# Altium footprint library IC.PcbLib: 204 footprints (part 7 of 13)
Each footprint in its own frame and in the unit in brackets; x right, y up, seen from the top. Pads: shape width x height; smd on the part's side, far side on the other; paste and mask are expansions set on the pad; w line width, h text height; cw(c..) or ccw(c..) is an arc to the next point about the centre after c.
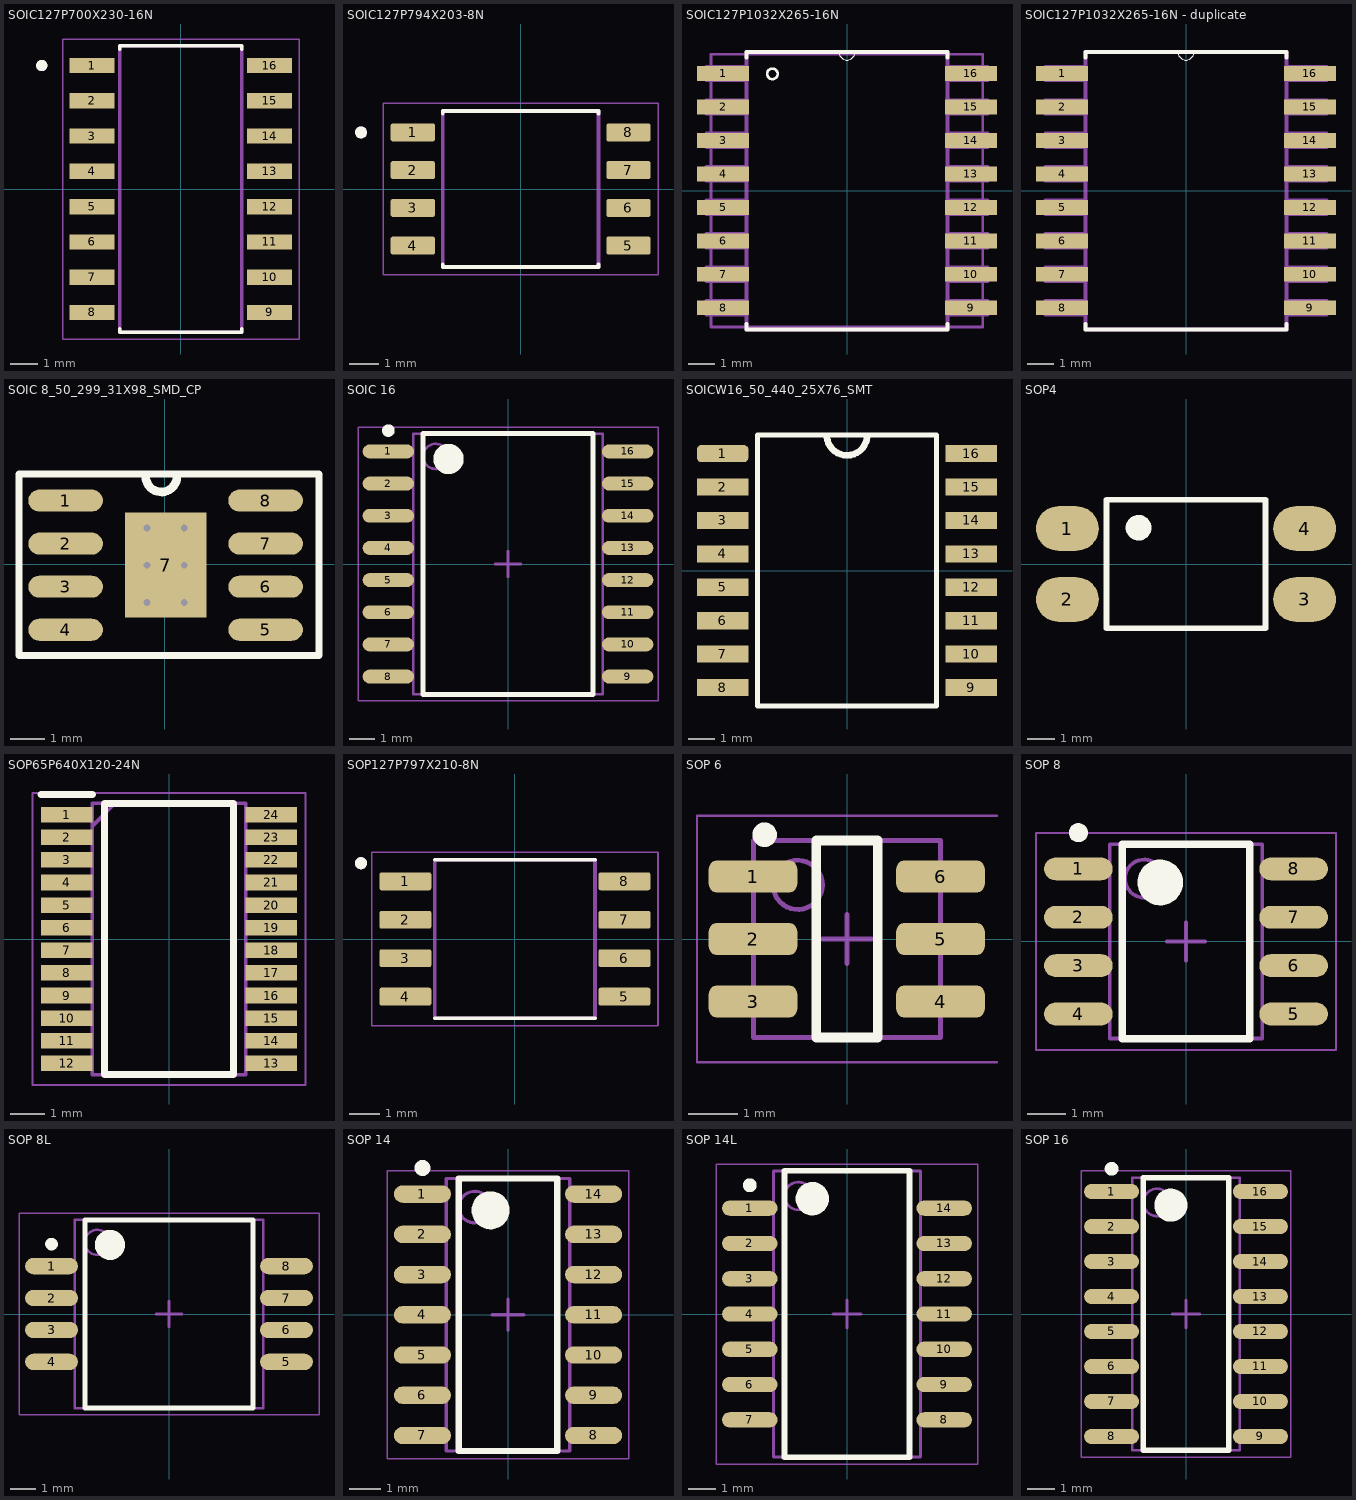
[diagram p6: the footprints below, top view; thin cyan lines are the x and y axes]

## SOIC127P700X230-16N [mm]
height 2.3
pads (16):
  rect 1.62x0.55 smd: 1(-3.195,4.445) 2(-3.195,3.175) 3(-3.195,1.905) 4(-3.195,0.635) 5(-3.195,-0.635) 6(-3.195,-1.905) 7(-3.195,-3.175) 8(-3.195,-4.445) 9(3.195,-4.445) 10(3.195,-3.175) 11(3.195,-1.905) 12(3.195,-0.635) 13(3.195,0.635) 14(3.195,1.905) 15(3.195,3.175) 16(3.195,4.445)
Top Overlay:
  circle w0.2: c-5.005,4.445 r0.1
  lines w0.127: -2.2,-5.04 -2.2,-5.15 2.2,-5.15 2.2,-5.04 ; -2.2,5.04 -2.2,5.15 2.2,5.15 2.2,5.04
Mechanical 13:
  circle w0.2: c-5.005,4.445 r0.1
  lines w0.127: -2.2,-5.15 -2.2,5.15 2.2,5.15 2.2,-5.15 -2.2,-5.15
Mechanical 15:
  lines w0.05: -4.255,-5.4 4.255,-5.4 4.255,5.4 -4.255,5.4 -4.255,-5.4
3D body "step_temp.STEP": height 2.3, standoff 0, extent -3.5,-5.15 3.5,5.15

## SOIC127P794X203-8N [mm]
height 2.03
pads (8):
  rrect25% 1.49x0.61 smd paste+0 mask+0.102: 1(-3.63,1.905) 2(-3.63,0.635) 3(-3.63,-0.635) 4(-3.63,-1.905) 5(3.63,-1.905) 6(3.63,-0.635) 7(3.63,0.635) 8(3.63,1.905)
Top Overlay:
  circle w0.2: c-5.375,1.905 r0.1
  lines w0.127: -2.625,-2.53 -2.625,-2.63 2.625,-2.63 2.625,-2.53 ; -2.625,2.53 -2.625,2.63 2.625,2.63 2.625,2.53
Mechanical 13:
  circle w0.2: c-5.375,1.905 r0.1
  lines w0.127: -2.625,-2.63 2.625,-2.63 2.625,2.63 -2.625,2.63 -2.625,-2.63
Mechanical 15:
  lines w0.05: -4.625,-2.88 -4.625,2.88 4.625,2.88 4.625,-2.88 -4.625,-2.88
3D body "SO8 Medium 5.28mm.step": height 2.03, standoff 0, extent -4.13,-2.665 4.13,2.665

## SOIC127P1032X265-16N [mil]
pads (16):
  rect 78x22 smd: 1(-185,175) 2(-185,125) 3(-185,75) 4(-185,25) 5(-185,-25) 6(-185,-75) 7(-185,-125) 8(-185,-175) 9(185,-175) 10(185,-125) 11(185,-75) 12(185,-25) 13(185,25) 14(185,75) 15(185,125) 16(185,175)
Top Overlay:
  circle w3.94: c-111.42,174.41 r7.87
  lines w0: -12,207 ccw(c0,207) 12,207
  lines w6: -150,-199 -150,-207 150,-207 150,-199 ; -150,199 -150,207 -12,207 12,207 150,207 150,199
Top Assembly:
  lines w3.94: -203.15,-203.54 -203.15,203.54 202.76,203.54 202.76,-203.54 -203.15,-203.54
  text "+" at -8.27,-12.74 h39.37
Mechanical 13:
  lines w0: -12,207 ccw(c0,207) 12,207
  lines w6: -210,-185 -210,-165 -150,-165 -150,-185 -210,-185 ; -210,-135 -210,-115 -150,-115 -150,-135 -210,-135 ; -210,-85 -210,-65 -150,-65 -150,-85 -210,-85 ; -210,-35 -210,-15 -150,-15 -150,-35 -210,-35 ; -210,15 -210,35 -150,35 -150,15 -210,15 ; -210,65 -210,85 -150,85 -150,65 -210,65 ; -210,115 -210,135 -150,135 -150,115 -210,115 ; -210,165 -210,185 -150,185 -150,165 -210,165 ; -150,-207 150,-207 150,207 12,207 -12,207 -150,207 -150,-207 ; 150,-185 150,-165 210,-165 210,-185 150,-185 ; 150,-135 150,-115 210,-115 210,-135 150,-135 ; 150,-85 150,-65 210,-65 210,-85 150,-85 ; 150,-35 150,-15 210,-15 210,-35 150,-35 ; 150,15 150,35 210,35 210,15 150,15 ; 150,65 150,85 210,85 210,65 150,65 ; 150,115 150,135 210,135 210,115 150,115 ; 150,165 150,185 210,185 210,165 150,165
3D body "User Library-SO-16W.STEP": height 97.64, standoff 0, extent -202.95,-203.36 202.96,203.34

## SOIC127P1032X265-16N - duplicate [mil]
pads (16):
  rect 78x22 smd: 1(-185,175) 2(-185,125) 3(-185,75) 4(-185,25) 5(-185,-25) 6(-185,-75) 7(-185,-125) 8(-185,-175) 9(185,-175) 10(185,-125) 11(185,-75) 12(185,-25) 13(185,25) 14(185,75) 15(185,125) 16(185,175)
Top Overlay:
  lines w0: -12,207 ccw(c0,207) 12,207
  lines w6: -150,-199 -150,-207 150,-207 150,-199 ; -150,199 -150,207 -12,207 12,207 150,207 150,199
Mechanical 13:
  lines w0: -12,207 ccw(c0,207) 12,207
  lines w6: -210,-185 -150,-185 -150,-165 -210,-165 -210,-185 ; -210,-135 -150,-135 -150,-115 -210,-115 -210,-135 ; -210,-85 -150,-85 -150,-65 -210,-65 -210,-85 ; -210,-35 -150,-35 -150,-15 -210,-15 -210,-35 ; -210,15 -150,15 -150,35 -210,35 -210,15 ; -210,65 -150,65 -150,85 -210,85 -210,65 ; -210,115 -150,115 -150,135 -210,135 -210,115 ; -210,165 -150,165 -150,185 -210,185 -210,165 ; -150,-207 -150,207 -12,207 12,207 150,207 150,-207 -150,-207 ; 150,-185 210,-185 210,-165 150,-165 150,-185 ; 150,-135 210,-135 210,-115 150,-115 150,-135 ; 150,-85 210,-85 210,-65 150,-65 150,-85 ; 150,-35 210,-35 210,-15 150,-15 150,-35 ; 150,15 210,15 210,35 150,35 150,15 ; 150,65 210,65 210,85 150,85 150,65 ; 150,115 210,115 210,135 150,135 150,115 ; 150,165 210,165 210,185 150,185 150,165

## SOIC 8_50_299_31X98_SMD_CP [mm]
pads (9):
  oval 2.2x0.65 smd: 1(-2.925,1.88) 2(-2.925,0.61) 3(-2.925,-0.66) 4(-2.925,-1.93) 5(2.975,-1.93) 6(2.975,-0.66) 7(2.975,0.61) 8(2.975,1.88)
  rect 2.4x3.1 smd: 7(0.025,-0.025)
via -0.525,1.075 diameter 0.5 hole 0.2
via 0.575,1.075 diameter 0.5 hole 0.2
via -0.525,-0.025 diameter 0.5 hole 0.2
via 0.575,-0.025 diameter 0.5 hole 0.2
via -0.525,-1.125 diameter 0.5 hole 0.2
via 0.575,-1.125 diameter 0.5 hole 0.2
Top Overlay:
  lines w0.2: -4.3,-2.692 -4.3,2.667 4.55,2.667 4.55,-2.692 -4.3,-2.692
  lines w0.254: -0.559,2.615 ccw(c-0.102,2.591) 0.356,2.591
3D body "SOIC127P600-8N.step": height 1.7, standoff 0, extent -2.974,-2.525 3.025,2.475

## SOIC 16 [mm] "SOIC, 16-Leads, Body 10.30x7.50mm, Pitch 1.27mm, IPC Medium Density"
height 2.4
pads (16):
  oval 2.032x0.55 smd: 1(-4.725,4.445) 2(-4.725,3.175) 3(-4.725,1.905) 4(-4.725,0.635) 5(-4.725,-0.635) 6(-4.725,-1.905) 7(-4.725,-3.175) 8(-4.725,-4.445) 9(4.725,-4.445) 10(4.725,-3.175) 11(4.725,-1.905) 12(4.725,-0.635) 13(4.725,0.635) 14(4.725,1.905) 15(4.725,3.175) 16(4.725,4.445)
Top Overlay:
  circle w0.25: c-4.725,5.27 r0.125
  circle w0.6: c-2.35,4.15 r0.3
  lines w0.2: -3.35,-5.15 -3.35,5.15 3.35,5.15 3.35,-5.15 -3.35,-5.15
Mechanical 13:
  circle w0.1: c-2.85,4.25 r0.5
  lines w0.1: -3.75,-5.15 -3.75,5.15 3.75,5.15 3.75,-5.15 -3.75,-5.15
Mechanical 15:
  lines w0.05: -5.925,-5.4 -5.925,5.4 5.925,5.4 5.925,-5.4 -5.925,-5.4
  lines w0.1: -0.5,0 0.5,0 ; 0,-0.5 0,0.5
3D body "User Library-SO-16W.STEP": height 2.48, standoff 0, extent -5.155,-5.165 5.155,5.165

## SOICW16_50_440_25X76_SMT [mm] "SOICW"
height 2.6
pads (16):
  rrect50% 1.95x0.65 smd: 1(-4.725,4.445)
  rect 1.95x0.65 smd: 2(-4.725,3.175) 3(-4.725,1.905) 4(-4.725,0.635) 5(-4.725,-0.635) 6(-4.725,-1.905) 7(-4.725,-3.175) 8(-4.725,-4.445) 9(4.725,-4.445) 10(4.725,-3.175) 11(4.725,-1.905) 12(4.725,-0.635) 13(4.725,0.635) 14(4.725,1.905) 15(4.725,3.175) 16(4.725,4.445)
Top Overlay:
  lines w0.2: -3.4,-5.15 3.4,-5.15 3.4,5.15 -3.4,5.15 -3.4,-5.15
  lines w0.254: -0.767,5.077 ccw(c0,5.15) 0.769,5.105
3D body "ACS720KLATR-65AB-T.stp": height 2.65, standoff 0, extent -5.15,-5.15 5.15,5.15

## SOP4 [mm]
pads (4):
  oval 2.25x1.6 smd: 1(-4.25,1.27) 2(-4.25,-1.27) 3(4.25,-1.27) 4(4.25,1.27)
Top Overlay:
  circle w0.2: c-1.7,1.3 r0.361
  region: -1.4,1.003 -2.006,1.003 -2.006,1.6 -1.4,1.6
  lines w0.2: -2.85,-2.3 2.85,-2.3 2.85,2.3 -2.85,2.3 -2.85,-2.3
3D body "pc817x1nip1b.stp": height 3.6, standoff 0, extent -4.673,-2.286 4.927,2.314

## SOP65P640X120-24N [mm]
pads (24):
  rect 1.475x0.45 smd: 1(-2.938,3.575) 2(-2.938,2.925) 3(-2.938,2.275) 4(-2.938,1.625) 5(-2.938,0.975) 6(-2.938,0.325) 7(-2.938,-0.325) 8(-2.938,-0.975) 9(-2.938,-1.625) 10(-2.938,-2.275) 11(-2.938,-2.925) 12(-2.938,-3.575) 13(2.938,-3.575) 14(2.938,-2.925) 15(2.938,-2.275) 16(2.938,-1.625) 17(2.938,-0.975) 18(2.938,-0.325) 19(2.938,0.325) 20(2.938,0.975) 21(2.938,1.625) 22(2.938,2.275) 23(2.938,2.925) 24(2.938,3.575)
Top Overlay:
  lines w0.2: -3.675,4.15 -2.2,4.15 ; -1.85,-3.9 -1.85,3.9 1.85,3.9 1.85,-3.9 -1.85,-3.9
Mechanical 13:
  lines w0.05: -3.925,-4.2 -3.925,4.2 3.925,4.2 3.925,-4.2 -3.925,-4.2
  lines w0.1: -2.2,3.25 -1.55,3.9 ; -2.2,-3.9 -2.2,3.9 2.2,3.9 2.2,-3.9 -2.2,-3.9
3D body "step_temp.STEP": height 1.2, standoff 0, extent -3.2,-3.9 3.2,3.9

## SOP127P797X210-8N [mm]
height 2.1
pads (8):
  rrect25% 1.72x0.59 smd: 1(-3.62,1.905) 2(-3.62,0.635) 3(-3.62,-0.635) 4(-3.62,-1.905) 5(3.62,-1.905) 6(3.62,-0.635) 7(3.62,0.635) 8(3.62,1.905)
Top Overlay:
  circle w0.2: c-5.085,2.505 r0.1
  lines w0.127: -2.65,-2.62 2.65,-2.62 ; -2.65,2.62 2.65,2.62
Mechanical 13:
  circle w0.2: c-5.085,2.505 r0.1
  lines w0.127: -2.65,-2.62 -2.65,2.62 2.65,2.62 2.65,-2.62 -2.65,-2.62
Mechanical 15:
  lines w0.05: -4.73,-2.87 -4.73,2.87 4.73,2.87 4.73,-2.87 -4.73,-2.87
  text "+" at -0.21,-0.314 h1
3D body "step_temp.STEP": height 2.1, standoff 0, extent -3.985,-2.62 3.985,2.62

## SOP 6 [mm] "SOP6"
height 1.1
pads (6):
  rrect50% 1.8x0.65 smd: 1(-1.91,1.27) 2(-1.91,0) 3(-1.91,-1.27) 4(1.9,-1.27) 5(1.9,0) 6(1.9,1.27)
Top Overlay:
  circle w0.25: c-1.675,2.12 r0.125
  lines w0.2: -0.625,-2 0.625,-2 0.625,2 -0.625,2 -0.625,-2
Mechanical 13:
  circle w0.1: c-1,1.1 r0.5
  lines w0.1: -1.9,-2 1.9,-2 1.9,2 -1.9,2 -1.9,-2
Mechanical 15:
  lines w0.05: 3.048,-2.5 -3.048,-2.5 -3.048,2.5 3.048,2.5
  lines w0.1: -0.5,0 0.5,0 ; 0,-0.5 0,0.5
3D body "SOIC127P490X150-6N.step": height 1.5, standoff 0, extent -2.45,-2 2.45,2

## SOP 8 [mm] "SOIC, 8-Leads, Body 4.9x3.9mm, Pitch 1.27mm, IPC High Density"
pads (8):
  oval 1.8x0.6 smd: 1(-2.825,1.905) 2(-2.825,0.635) 3(-2.825,-0.635) 4(-2.825,-1.905) 5(2.825,-1.905) 6(2.825,-0.635) 7(2.825,0.635) 8(2.825,1.905)
Top Overlay:
  circle w0.6: c-0.675,1.55 r0.3
  circle w0.25: c-2.825,2.855 r0.125
  lines w0.2: -1.675,-2.55 1.675,-2.55 1.675,2.55 -1.675,2.55 -1.675,-2.55
Mechanical 13:
  circle w0.1: c-1.1,1.65 r0.5
  lines w0.1: -2,-2.55 2,-2.55 2,2.55 -2,2.55 -2,-2.55
Mechanical 15:
  lines w0.05: -3.937,-2.85 3.937,-2.85 3.937,2.85 -3.937,2.85 -3.937,-2.85
  lines w0.1: -0.5,0 0.5,0 ; 0,-0.5 0,0.5
3D body "CircuitWorks-SO-8 (PIC12FXXX).step": height 1.6, standoff 0, extent -2.995,-2.45 2.995,2.45

## SOP 8L [mm] "SOIC, 8-Leads, Body 7.50x7.50mm, Pitch 1.27mm, IPC Medium Density"
height 1.5
pads (8):
  oval 2.1x0.65 smd: 1(-4.675,1.905) 2(-4.675,0.635) 3(-4.675,-0.635) 4(-4.675,-1.905) 5(4.675,-1.905) 6(4.675,-0.635) 7(4.675,0.635) 8(4.675,1.905)
Top Overlay:
  circle w0.25: c-4.675,2.78 r0.125
  circle w0.6: c-2.35,2.75 r0.3
  lines w0.2: -3.35,-3.75 -3.35,3.75 3.35,3.75 3.35,-3.75 -3.35,-3.75
Mechanical 13:
  circle w0.1: c-2.85,2.85 r0.5
  lines w0.1: -3.75,-3.75 -3.75,3.75 3.75,3.75 3.75,-3.75 -3.75,-3.75
Mechanical 15:
  lines w0.05: -5.969,-4 -5.969,4 5.969,4 5.969,-4 -5.969,-4
  lines w0.1: -0.5,0 0.5,0 ; 0,-0.5 0,0.5
3D body "SOIC127P1000X150-8N.step": height 1.5, standoff 0, extent -5,-3.65 5,3.65

## SOP 14 [mm] "SOIC, 14-Leads, Body 8.60x3.90mm, Pitch 1.27mm, IPC Medium Density"
height 1.75
pads (14):
  oval 1.8x0.55 smd: 1(-2.7,3.81) 2(-2.7,2.54) 3(-2.7,1.27) 4(-2.7,0) 5(-2.7,-1.27) 6(-2.7,-2.54) 7(-2.7,-3.81) 8(2.7,-3.81) 9(2.7,-2.54) 10(2.7,-1.27) 11(2.7,0) 12(2.7,1.27) 13(2.7,2.54) 14(2.7,3.81)
Top Overlay:
  circle w0.6: c-0.55,3.3 r0.3
  circle w0.25: c-2.7,4.635 r0.125
  lines w0.2: -1.55,-4.3 1.55,-4.3 1.55,4.3 -1.55,4.3 -1.55,-4.3
Mechanical 13:
  circle w0.1: c-1.05,3.4 r0.5
  lines w0.1: -1.95,-4.3 1.95,-4.3 1.95,4.3 -1.95,4.3 -1.95,-4.3
Mechanical 15:
  lines w0.05: -3.81,-4.55 3.81,-4.55 3.81,4.55 -3.81,4.55 -3.81,-4.55
  lines w0.1: -0.5,0 0.5,0 ; 0,-0.5 0,0.5
3D body "SOIC127P600X175-14N.step": height 1.75, standoff 0, extent -2.873,-4.3 3.127,4.3

## SOP 14L [mm] "SOIC, 14-Leads, Body 10.30x5.30mm, Pitch 1.27mm, IPC Medium Density"
height 2
pads (14):
  oval 2x0.55 smd: 1(-3.5,3.81) 2(-3.5,2.54) 3(-3.5,1.27) 4(-3.5,0) 5(-3.5,-1.27) 6(-3.5,-2.54) 7(-3.5,-3.81) 8(3.5,-3.81) 9(3.5,-2.54) 10(3.5,-1.27) 11(3.5,0) 12(3.5,1.27) 13(3.5,2.54) 14(3.5,3.81)
Top Overlay:
  circle w0.25: c-3.5,4.635 r0.125
  circle w0.6: c-1.25,4.15 r0.3
  lines w0.2: -2.25,-5.15 -2.25,5.15 2.25,5.15 2.25,-5.15 -2.25,-5.15
Mechanical 13:
  circle w0.1: c-1.75,4.25 r0.5
  lines w0.1: -2.65,-5.15 -2.65,5.15 2.65,5.15 2.65,-5.15 -2.65,-5.15
Mechanical 15:
  lines w0.05: -4.699,-5.4 -4.699,5.4 4.699,5.4 4.699,-5.4 -4.699,-5.4
  lines w0.1: -0.5,0 0.5,0 ; 0,-0.5 0,0.5
3D body "SOIC127P760X150-14N.step": height 1.5, standoff 0, extent -3.81,-5.15 3.81,5.15

## SOP 16 [mm] "SOIC, 16-Leads, Body 9.90x3.91mm, Pitch 1.27mm, IPC Medium Density"
height 1.75
pads (16):
  oval 2x0.55 smd: 1(-2.7,4.445) 2(-2.7,3.175) 3(-2.7,1.905) 4(-2.7,0.635) 5(-2.7,-0.635) 6(-2.7,-1.905) 7(-2.7,-3.175) 8(-2.7,-4.445) 9(2.7,-4.445) 10(2.7,-3.175) 11(2.7,-1.905) 12(2.7,-0.635) 13(2.7,0.635) 14(2.7,1.905) 15(2.7,3.175) 16(2.7,4.445)
Top Overlay:
  circle w0.25: c-2.7,5.27 r0.125
  circle w0.6: c-0.55,3.95 r0.3
  lines w0.2: -1.55,-4.95 -1.55,4.95 1.55,4.95 1.55,-4.95 -1.55,-4.95
Mechanical 13:
  circle w0.1: c-1.05,4.05 r0.5
  lines w0.1: -1.95,-4.95 -1.95,4.95 1.95,4.95 1.95,-4.95 -1.95,-4.95
Mechanical 15:
  lines w0.05: -3.81,-5.2 -3.81,5.2 3.81,5.2 3.81,-5.2 -3.81,-5.2
  lines w0.1: -0.5,0 0.5,0 ; 0,-0.5 0,0.5
3D body "User Library-SOIC-16-1.step": height 1.4, standoff 0, extent -3,-4.95 3,4.95